# Altium footprint library HS_HS91L02W2C01.PcbLib: 1 footprints
Each footprint in its own frame and in the unit in brackets; x right, y up, seen from the top. Pads: shape width x height; smd on the part's side, far side on the other; paste and mask are expansions set on the pad; w line width, h text height; cw(c..) or ccw(c..) is an arc to the next point about the centre after c.
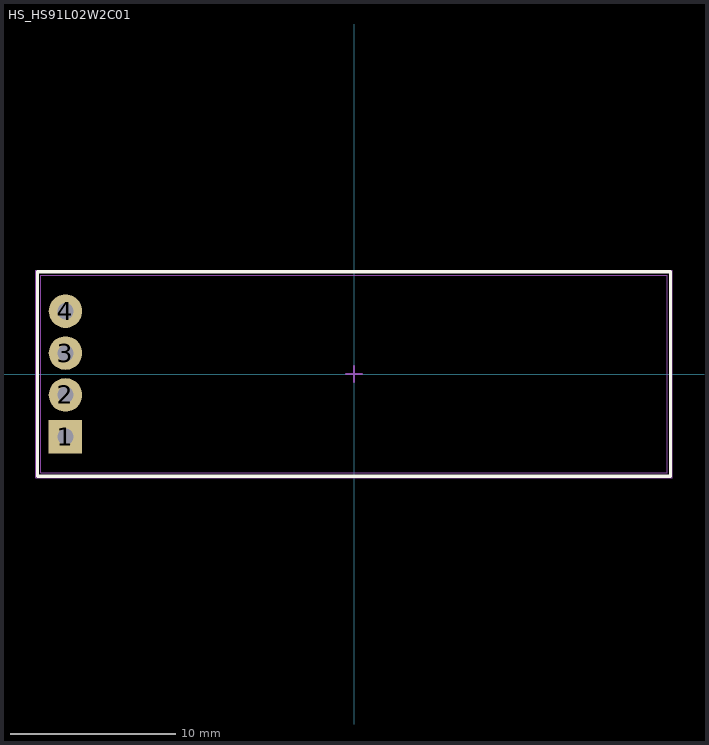
[diagram p0: the footprint, top view; thin cyan lines are the x and y axes]

## HS_HS91L02W2C01 [mil]
height 50
pads (4):
  rect 80x80 hole 39.37: 1(-688.98,-150)
  round 80 hole 39.37: 2(-688.98,-50) 3(-688.98,50) 4(-688.98,150)
Top Overlay:
  lines w7.87: -755.91,-244.09 755.91,-244.09 755.91,244.09 -755.91,244.09 -755.91,-244.09
Mechanical 13:
  lines w1.97: -748.03,-236.22 748.03,-236.22 748.03,236.22 -748.03,236.22 -748.03,-236.22
Mechanical 15:
  lines w1.97: -759.84,-248.03 -759.84,248.03 759.84,248.03 759.84,-248.03 -759.84,-248.03
  lines w3.94: -19.68,0 19.68,0 ; 0,-19.68 0,19.69
3D body: height 102.36, standoff 0.04, extent -748.03,-236.22 748.03,236.22